# EAGLE library part M41T82ZM6F (library M41T82ZM6F)
M41T82ZM6F, Real Time Clock, Alarm, Calendar, Clock, 32B RAM, I2C, 2.38 to 5.5V, 8-Pin SOIC Source: Datasheet <https://www.st.com/resource/en/datasheet/m41t82.pdf>
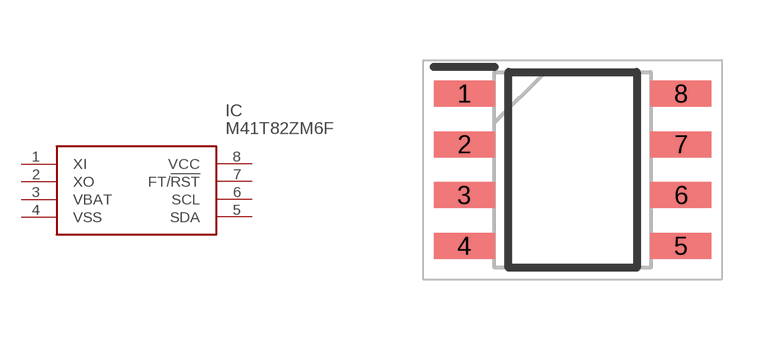
[diagram p0: symbol with the pads of SOIC127P600X175-8N; footprint SOIC127P600X175-8N]

Designator prefix IC

## M41T82ZM6F (Description: M41T82ZM6F, Real Time Clock, Alarm, Calendar, Clock, 32B RAM, I2C, 2.38 to 5.5V, 8-Pin SOIC; Height: 1.75mm; Manufacturer_Name: STMicroelectronics; Manufacturer_Part_Number: M41T82ZM6F; Mouser_Part_Number: 511-M41T82ZM6F; Mouser_Price-Stock: https://www.mouser.co.uk/ProductDetail/STMicroelectronics/M41T82ZM6F?qs=9fArFXnEOlK%2FxcsT9Q7OUQ%3D%3D)  [SOIC127P600X175-8N]
1  XI
2  XO
3  VBAT
4  VSS
5  SDA
6  SCL
7  FT/!RST
8  VCC

## Footprint SOIC127P600X175-8N (pad centres in mm)
. SO-8 mechanicalsss data-
smd 1.525 x 0.65: 1 -2.712,1.905; 2 -2.712,0.635; 3 -2.712,-0.635; 4 -2.712,-1.905; 5 2.712,-1.905; 6 2.712,-0.635; 7 2.712,0.635; 8 2.712,1.905